# Altium integrated library Capacitores.IntLib: 45 symbols
Pins are listed as number, name and electrical type; pins without a type are passive.

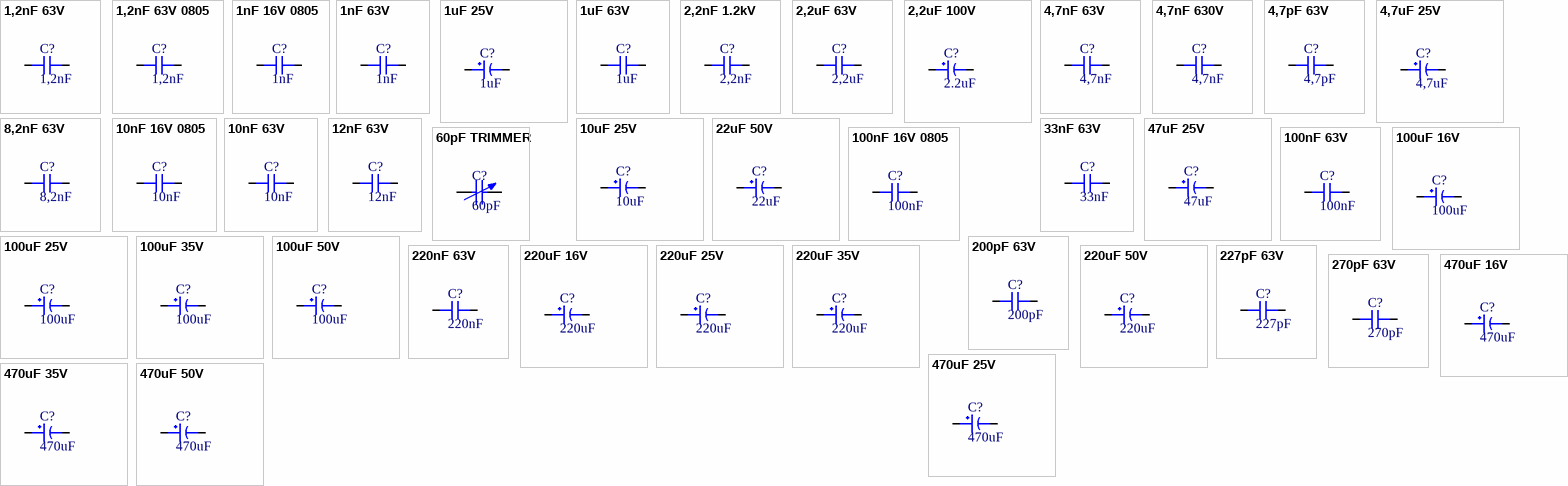
[diagram p0: symbols 1,2nF 63V to 470uF 50V]

## 1,2nF 63V
designator C?, comment 1,2nF
FILM CAPACITORS 1,2nF 63V
footprint FILM 5mm 2,5 x 6,5 x 7,3
pins: 1, 2

## 1,2nF 63V 0805
designator C?, comment 1,2nF
Capacitor 0805 1,2nF 63V
footprint 0805 Capacitor
pins: 1, 2

## 1nF 16V 0805
designator C?, comment 1nF
Capacitor 0805 1nF 16V
footprint 0805 Capacitor
pins: 1, 2

## 1nF 63V
designator C?, comment 1nF
FILM CAPACITORS 1nF 63V
footprint FILM 5mm 2,5 x 6,5 x 7,3
pins: 1, 2

## 1uF 25V
designator C?, comment 1uF
ELETROLYTIC CAPACITOR 1uF 25V
footprint ELT 2mm 5 x 11,5 (Cap_Ele_5x11,5mm_2mm_Pitch)
pins: 1, 2

## 1uF 63V
designator C?, comment 1uF
FILM CAPACITOR
footprint FILM 5mm 7 x 9 x 4,5
pins: 1, 2

## 2,2nF 1.2kV
designator C?, comment 2,2nF
FILM CAPACITORS 2,2nF 1.2kV - B32692
footprint 15mm_Polyester
pins: 1, 2

## 2,2uF 63V
designator C?, comment 2,2uF
FILM CAPACITOR
footprint FILM 5mm 7,6 x 12.5 x 7
pins: 1, 2

## 2,2uF 100V
designator C?, comment 2.2uF
ELETROLYTIC CAPACITOR 2,2uF 100V
footprint ELT 2mm 5 x 11,5 (Cap_Ele_5x11,5mm_2mm_Pitch)
pins: 1, 2

## 4,7nF 63V
designator C?, comment 4,7nF
FILM CAPACITORS 4,7nF 63V
footprint FILM 5mm 2,5 x 6,5 x 7,3
pins: 1, 2

## 4,7nF 630V
designator C?, comment 4,7nF
FILM CAPACITORS 4,7nF 630V
footprint 4,7nF 630V
pins: 1, 2

## 4,7pF 63V
designator C?, comment 4,7pF
CERAMIC CAPACITORS 4,7pF 63V
footprint CERA 2.54mm
pins: 1, 2

## 4,7uF 25V
designator C?, comment 4,7uF
ELETROLYTIC CAPACITOR 4,7uF 25V
footprint ELT 5mm 5 x 12
pins: 1, 2

## 8,2nF 63V
designator C?, comment 8,2nF
FILM CAPACITORS 8,2nF 63V
footprint FILM 5mm 2,5 x 6,5 x 7,3
pins: 1, 2

## 10nF 16V 0805
designator C?, comment 10nF
Capacitor 0805 10nF 16V
footprint 0805 Capacitor
pins: 1, 2

## 10nF 63V
designator C?, comment 10nF
FILM CAPACITORS 10nF 63V
footprint FILM 5mm 2,5 x 6,5 x 7,3
pins: 1, 2

## 10uF 25V
designator C?, comment 10uF
ELETROLYTIC CAPACITOR 10uF 25V
footprint ELT 5mm 5 x 12
pins: 1, 2

## 12nF 63V
designator C?, comment 12nF
FILM CAPACITORS 12nF 63V
footprint FILM 5mm 2,5 x 6,5 x 7,3
pins: 1, 2

## 22uF 50V
designator C?, comment 22uF
ELETROLYTIC CAPACITOR 22uF 50V
footprint ELT 2mm 5 x 11,5 (Cap_Ele_5x11,5mm_2mm_Pitch)
pins: 1, 2

## 33nF 63V
designator C?, comment 33nF
FILM CAPACITORS 33nF 63V
footprint FILM 5mm 2,5 x 6,5 x 7,3
pins: 1, 2

## 47uF 25V
designator C?, comment 47uF
ELETROLYTIC CAPACITOR 47uF 25V
footprint ELT 2mm 5 x 11,5 (Cap_Ele_5x11,5mm_2mm_Pitch)
pins: 1, 2

## 60pF TRIMMER
designator C?, comment 60pF
CAPACITOR TRIMMER MURATA 60 pF
footprint VARICAP (MURATA)
pins: 1, 2

## 100nF 16V 0805
designator C?, comment 100nF
Capacitor 0805 100nF 16V
footprint 0805 Capacitor
pins: 1, 2

## 100nF 63V
designator C?, comment 100nF
FILM CAPACITORS 100nF 63V
footprint FILM 5mm 2,5 x 6,5 x 7,3
pins: 1, 2

## 100uF 16V
designator C?, comment 100uF
CAPACITOR ELETROLITICO 100uF 16V
footprint elt 2,5mm 6,3 x 12 (6,3x12mm - 2.54mm)
footprint SMD 100uF 16V
pins: 1, 2

## 100uF 25V
designator C?, comment 100uF
ELETROLYTIC CAPACITOR 100uF 25V
footprint elt 2,5mm 6,3 x 12 (6,3x12mm - 2.54mm)
pins: 1, 2

## 100uF 35V
designator C?, comment 100uF
ELETROLYTIC CAPACITOR 100uF 35V
footprint SMD 100uF 35V
pins: 1, 2

## 100uF 50V
designator C?, comment 100uF
ELETROLYTIC CAPACITOR 100uF 50V
footprint SMD 100uF 50V
pins: 1, 2

## 200pF 63V
designator C?, comment 200pF
CERAMIC CAPACITORS 200pF 63V
footprint CERA 5mm
pins: 1, 2

## 220nF 63V
designator C?, comment 220nF
FILM CAPACITORS 220nF 63V
footprint FILM 5mm 2,5 x 6,5 x 7,3
pins: 1, 2

## 220uF 16V
designator C?, comment 220uF
ELETROLYTIC CAPACITOR 220uF 16V
footprint SMD 100uF 16V
pins: 1, 2

## 220uF 25V
designator C?, comment 220uF
ELETROLYTIC CAPACITOR 220uF 25V
footprint ELT 3.5mm 8 x 14
footprint SMD 220uF 25V
pins: 1, 2

## 220uF 35V
designator C?, comment 220uF
ELETROLYTIC CAPACITOR 220uF 35V
footprint SMD 220uF 35V
pins: 1, 2

## 220uF 50V
designator C?, comment 220uF
ELETROLYTIC CAPACITOR 220uF 50V
footprint SMD 220uF 50V
pins: 1, 2

## 227pF 63V
designator C?, comment 227pF
CERAMIC CAPACITORS 227pF 63V
footprint CERA 5mm
pins: 1, 2

## 270pF 63V
designator C?, comment 270pF
CERAMIC CAPACITORS 270pF 63V
footprint CERA 5mm
pins: 1, 2

## 470uF 16V
designator C?, comment 470uF
ELETROLYTIC CAPACITOR 470uF 16V
footprint SMD 470uF 16V
pins: 1, 2

## 470uF 25V
designator C?, comment 470uF
ELETROLYTIC CAPACITOR 470uF 25V
footprint elt 5mm 10 x 13,5
footprint SMD 470uF 25V
pins: 1, 2

## 470uF 35V
designator C?, comment 470uF
ELETROLYTIC CAPACITOR 470uF 35V
footprint SMD 470uF 35V
pins: 1, 2

## 470uF 50V
designator C?, comment 470uF
ELETROLYTIC CAPACITOR 470uF 50V
footprint SMD 470uF 50V
pins: 1, 2

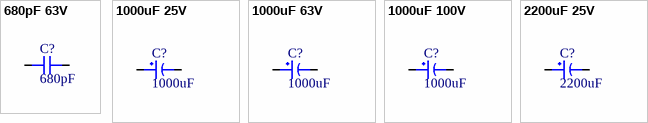
[diagram p1: symbols 680pF 63V to 2200uF 25V]

## 680pF 63V
designator C?, comment 680pF
CERAMIC CAPACITORS 680pF 63V
footprint CERA 5mm
pins: 1, 2

## 1000uF 25V
designator C?, comment 1000uF
ELETROLYTIC CAPACITOR 1000uF 25V
footprint ELT 5mm 10 x 17
pins: 1, 2

## 1000uF 63V
designator C?, comment 1000uF
Horiz. CAPACITOR 1000uF 63V
footprint 1000uF 63V Horiz.
pins: 1, 2

## 1000uF 100V
designator C?, comment 1000uF
CAPACITOR 1000uF 100V EPCOS; Modelo: B41845
footprint 1000uF 100V Epcos (8mm Pitch)
pins: 1, 2

## 2200uF 25V
designator C?, comment 2200uF
ELETROLYTIC CAPACITOR 2200uF 25V
footprint ELT 7,5mm 16 x 21,5
pins: 1, 2